# Altium schematic symbol library OPA365AIDBVTG4.SchLib: 1 symbol
Pins are listed as number, name and electrical type; pins without a type are passive.

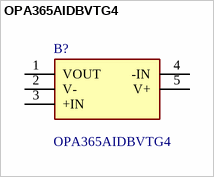
[diagram p0: symbol OPA365AIDBVTG4]

## OPA365AIDBVTG4
designator B?
OPERATIONAL AMPLIFIER; Manufacturer_Name: Texas Instruments; Geometry.Height: 1.45mm; Manufacturer_Part_Number: OPA365AIDBVTG4; Mouser Part Number: 595-OPA365AIDBVTG4; Mouser Price/Stock: https://www.mouser.co.uk/ProductDetail/Texas-Instruments/OPA365AIDBVTG4?qs=pJP364FAHqQWllaZFOaiyA%3D%3D; Arrow Part Number: OPA365AIDBVTG4; Arrow Price/Stock: https://www.arrow.com/en/products/opa365aidbvtg4/texas-instruments?region=nac; Datasheet Link: https://www.ti.com/lit/ds/symlink/opa365.pdf?HQS=TI-null-null-digikeymode-df-pf-null-wwe&ts=1599741864898
footprint SOT95P280X145-5N
pins: 1 VOUT, 2 V-, 3 +IN, 4 -IN, 5 V+